# Altium footprint library ics.PcbLib: 1 footprints
Each footprint in its own frame and in the unit in brackets; x right, y up, seen from the top. Pads: shape width x height; smd on the part's side, far side on the other; paste and mask are expansions set on the pad; w line width, h text height; cw(c..) or ccw(c..) is an arc to the next point about the centre after c.
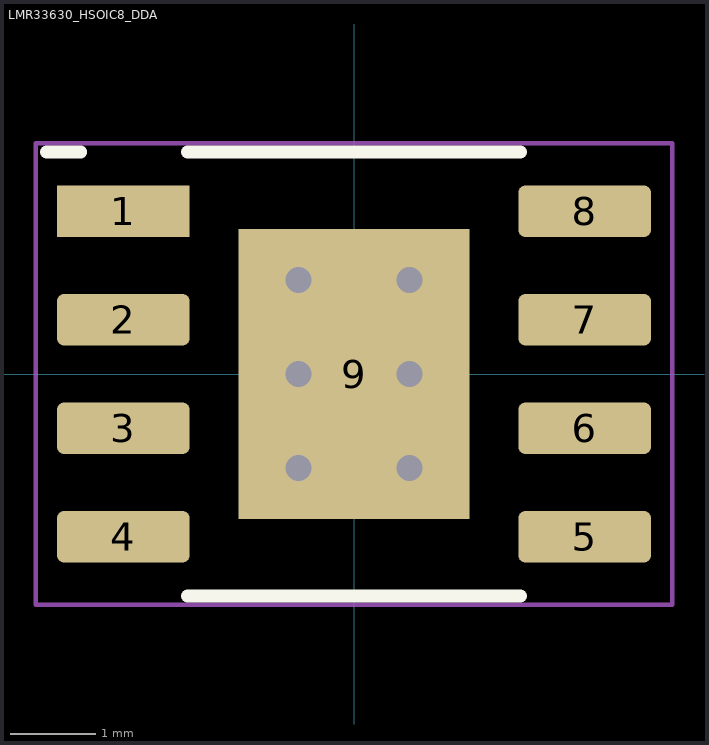
[diagram p0: the footprint, top view; thin cyan lines are the x and y axes]

## LMR33630_HSOIC8_DDA [mm] "TI DDA (HSOIC-8 PowerPAD) per SNVSAN3F DDA0008J/B; EP 2.71x3.4 fits J and B; 6 thermal vias 0.3/0.6 tented both sides (G1 2026-10-13)"
height 1.7
pads (9):
  rect 1.55x0.6 smd: 1(-2.7,1.905)
  rrect25% 1.55x0.6 smd: 2(-2.7,0.635) 3(-2.7,-0.635) 4(-2.7,-1.905) 5(2.7,-1.905) 6(2.7,-0.635) 7(2.7,0.635) 8(2.7,1.905)
  rect 2.71x3.4 smd paste-0.1: 9(0,0)
via 0.65,1.1 diameter 0.6 hole 0.3
via -0.65,1.1 diameter 0.6 hole 0.3
via 0.65,0 diameter 0.6 hole 0.3
via -0.65,0 diameter 0.6 hole 0.3
via 0.65,-1.1 diameter 0.6 hole 0.3
via -0.65,-1.1 diameter 0.6 hole 0.3
Top Overlay:
  lines w0.15: -3.6,2.6 -3.2,2.6 ; -1.95,-2.6 1.95,-2.6 ; -1.95,2.6 1.95,2.6
  text ".Designator" at 0,2.805 h1
Top Courtyard:
  lines w0.05: -3.725,-2.7 -3.725,2.7 3.725,2.7 3.725,-2.7 -3.725,-2.7
3D body: height 1.7, standoff 0, extent -1.95,-2.45 1.95,2.45